# Altium schematic symbol library REG1117.SchLib: 1 symbol
Pins are listed as number, name and electrical type; pins without a type are passive.

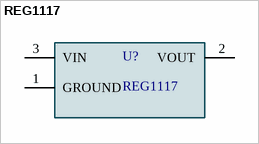
[diagram p0: symbol REG1117]

## REG1117
designator U?
800-mA, 15-V, linear voltage regulator 4-SOT-223 -40 to 125; MP: REG1117-3.3; MF: Texas Instruments; Mouser-Purchase-URL: https://snapeda.com/shop?store=Mouser&id=11155; Availability: Good; Price: None; DigiKey-Purchase-URL: https://snapeda.com/shop?store=DigiKey&id=11155; Package: SOT-223-4 Texas Instruments; Value: *; SnapEDA_Link: https://www.snapeda.com/parts/REG1117-3.3/Texas%20Instruments/view-part/11155/?ref=snap; Arrow_Electronics-Purchase-URL: https://snapeda.com/shop?store=Arrow+Electronics&id=11155; Texas_Instruments-Purchase-URL: https://snapeda.com/shop?store=Texas+Instruments&id=11155
footprint REG1117 (SOT230P700X180-4N)
pins: 1 GROUND (power), 2 VOUT (power), 3 VIN (power)